# Altium schematic symbol library pasive.SchLib: 7 symbols
Pins are listed as number, name and electrical type; pins without a type are passive.

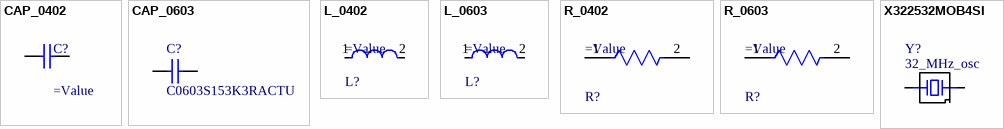
[diagram p0: symbols CAP_0402 to X322532MOB4SI]

## CAP_0402
designator C?
Part Number: C0402T103K4RACTU; Manufacturer: Kemet
footprint CAP_0402 (Chip Capacitor, 2-Leads, Body 1.00x0.50mm, IPC Medium Density)
pins: 1, 2
1 alternate drawing of the same symbol

## CAP_0603
designator C?, comment C0603S153K3RACTU
Manufacturer: Kemet; Part Number: C0603S153K3RACTU
footprint CAP_0603 (Chip Capacitor, 2-Leads, Body 1.60x0.80mm, IPC Medium Density)
pins: 1, 2
1 alternate drawing of the same symbol

## L_0402
designator L?
Wire Wound Ferrite type RF Inductor 140nH ±5% 650mA 0.216Ω 0402 (1005)
footprint L_0402
pins: 1, 2

## L_0603
designator L?
High Q Ceramic Chip Inductors 3.3nH 5% 0.024Ohm 1900mA 0603; DC Resistance (DCR): 24mR; Test Frequency: 250MHz; Max DC Current: 1.9A; Q Factor: 104; Self Resonant Frequency: 9.6GHz; Inductance: 3.3nH; Core Material: Ceramic; Height: 0.94mm; RoHS Compliant: Yes; Width: 1.09mm; Package Quantity: 2000; Termination: SMD/SMT; Series: 0603HP; Length: 1.75mm; Lead Free: Contains Lead; Packaging: Tape and Reel; Tolerance: 5%; Min Operating Temperature: -40°C; Max Operating Temperature: 125°C; Case/Package: 0603
footprint L_0603
pins: 1, 2

## R_0402
designator R?
RES SMD 1.2K OHM 1% 1/10W 0402; Resistance: 12400R; Tolerance: 1%; Lead Free: Lead Free; Width: 500um; Length: 1mm; Height: 320um; Case/Package: 0402
footprint Res_0402
pins: 1, 2

## R_0603
designator R?
1.54kΩ ±1% 0.1W 0603 Thick Film Chip Resistor AEC-Q200 compliant; Resistance: 1.54kR; Temperature Coefficient: 200ppm/°C; Max Operating Temperature: 155°C; Radiation Hardening: No; Packaging: Tape and Reel; Case/Package: 0603; Min Operating Temperature: -55°C; Mount: Surface Mount; Resistor Type: Thick Film; Tolerance: 1%; RoHS Compliant: Yes
footprint Res_0603
pins: 1, 2

## X322532MOB4SI
designator Y?, comment 32_MHz_osc
Part Number: X322532MOB4SI; frequency_(MHz): 32; JLCPCB Part #: C9009; Value: 32_MHz_osc; ComponentLink1URL: https://jlcpcb.com/api/file/downloadByFileSystemAccessId/8588879124404715520; ComponentLink1Description: Datasheet
footprint SMD3225-4P
pins: GND, IN, OUT